# EAGLE library part RJHSE-5380 (library RJHSE-5380)
Jack Modular Connector 8p8c (RJ45, Ethernet) 90 Angle (Right) Shielded, EMI Finger , 125VAC , 1.5A , -55C ~ 85C Source: Datasheet <https://cdn.amphenol-cs.com/media/wysiwyg/files/drawing/rjhsex380.pdf>
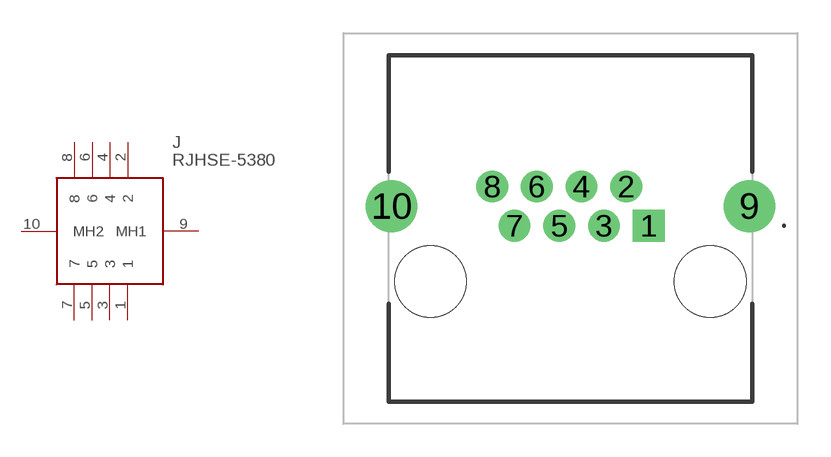
[diagram p0: symbol with the pads of RJHSE5380; footprint RJHSE5380]

Designator prefix J

## RJHSE-5380 (Description: Jack Modular Connector 8p8c (RJ45, Ethernet) 90 Angle (Right) Shielded, EMI Finger , 125VAC , 1.5A , -55C ~ 85C; Height: 13.716mm; Manufacturer_Name: Amphenol Communications Solutions; Manufacturer_Part_Number: RJHSE-5380)  [RJHSE5380]
1  1
2  2
3  3
4  4
5  5
6  6
7  7
8  8
9  MH1
10  MH2

## Footprint RJHSE5380 (pad centres in mm)
RJHSE-5380-2
drill 0.89 pad 1.446 square: 1 0,0
drill 0.89 pad 1.446: 2 -1.02,1.78; 3 -2.03,0; 4 -3.05,1.78; 5 -4.06,0; 6 -5.08,1.78; 7 -6.09,0; 8 -7.11,1.78
drill 1.57 pad 2.355: 9 4.58,0.89; 10 -11.68,0.89
hole 3.25 at 2.8,-2.54
hole 3.25 at -9.9,-2.54